# Altium schematic symbol library Fuse_Holder.SchLib: 1 symbol
Pins are listed as number, name and electrical type; pins without a type are passive.

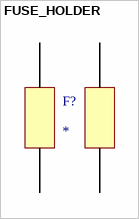
[diagram p0: symbol FUSE_HOLDER]

## FUSE_HOLDER
designator F?
CATRIDGE Fuse Holder (5*20mm)
footprint FUSE_HOLDER
pins: 1, 2, 3, 4